# Altium schematic symbol library Schlib1.SchLib: 1 symbol
Pins are listed as number, name and electrical type; pins without a type are passive.

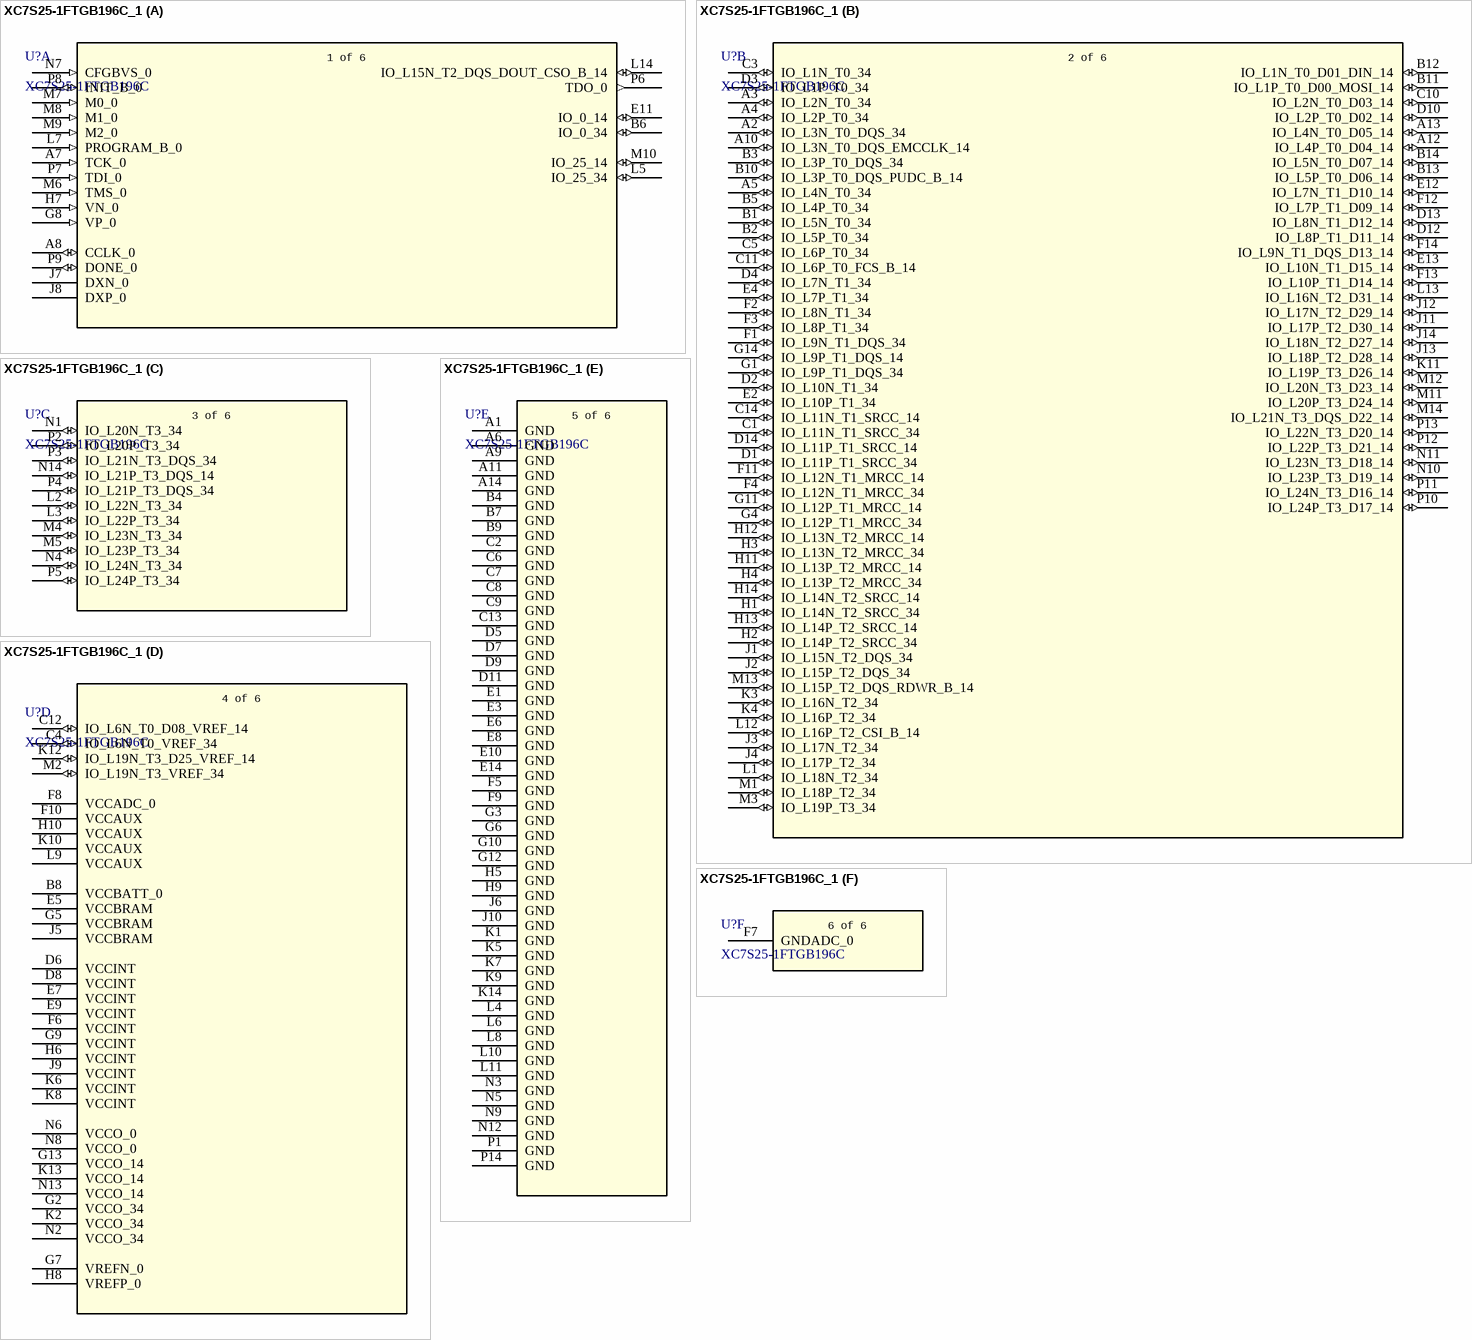
[diagram p0: symbol XC7S25-1FTGB196C_1]

## XC7S25-1FTGB196C_1
designator U?, comment XC7S25-1FTGB196C
Description; Manufacturer_Name: AMD; Type: Embedded; Copyright: Copyright (C) 2025 Ultra Librarian. All rights reserved.; Manufacturer_Part_Number: XC7S25-1FTGB196C; RefDes: RefDes
footprint FTGB196SPARTAN-7_AMD
part A pins: A7 TCK_0 (in), A8 CCLK_0 (io), B6 IO_0_34 (io), E11 IO_0_14 (io), G8 VP_0 (in), H7 VN_0 (in), J7 DXN_0, J8 DXP_0, L5 IO_25_34 (io), L7 PROGRAM_B_0 (in), L14 IO_L15N_T2_DQS_DOUT_CSO_B_14 (io), M6 TMS_0 (in), M7 M0_0 (in), M8 M1_0 (in), M9 M2_0 (in), M10 IO_25_14 (io), N7 CFGBVS_0 (in), P6 TDO_0 (out), P7 TDI_0 (in), P8 INIT_B_0 (io), P9 DONE_0 (io)
part B pins: A2 IO_L3N_T0_DQS_34 (io), A3 IO_L2N_T0_34 (io), A4 IO_L2P_T0_34 (io), A5 IO_L4N_T0_34 (io), A10 IO_L3N_T0_DQS_EMCCLK_14 (io), A12 IO_L4P_T0_D04_14 (io), A13 IO_L4N_T0_D05_14 (io), B1 IO_L5N_T0_34 (io), B2 IO_L5P_T0_34 (io), B3 IO_L3P_T0_DQS_34 (io), B5 IO_L4P_T0_34 (io), B10 IO_L3P_T0_DQS_PUDC_B_14 (io), B11 IO_L1P_T0_D00_MOSI_14 (io), B12 IO_L1N_T0_D01_DIN_14 (io), B13 IO_L5P_T0_D06_14 (io), B14 IO_L5N_T0_D07_14 (io), C1 IO_L11N_T1_SRCC_34 (io), C3 IO_L1N_T0_34 (io), C5 IO_L6P_T0_34 (io), C10 IO_L2N_T0_D03_14 (io), C11 IO_L6P_T0_FCS_B_14 (io), C14 IO_L11N_T1_SRCC_14 (io), D1 IO_L11P_T1_SRCC_34 (io), D2 IO_L10N_T1_34 (io), D3 IO_L1P_T0_34 (io), D4 IO_L7N_T1_34 (io), D10 IO_L2P_T0_D02_14 (io), D12 IO_L8P_T1_D11_14 (io), D13 IO_L8N_T1_D12_14 (io), D14 IO_L11P_T1_SRCC_14 (io), E2 IO_L10P_T1_34 (io), E4 IO_L7P_T1_34 (io), E12 IO_L7N_T1_D10_14 (io), E13 IO_L10N_T1_D15_14 (io), F1 IO_L9N_T1_DQS_34 (io), F2 IO_L8N_T1_34 (io), F3 IO_L8P_T1_34 (io), F4 IO_L12N_T1_MRCC_34 (io), F11 IO_L12N_T1_MRCC_14 (io), F12 IO_L7P_T1_D09_14 (io), F13 IO_L10P_T1_D14_14 (io), F14 IO_L9N_T1_DQS_D13_14 (io), G1 IO_L9P_T1_DQS_34 (io), G4 IO_L12P_T1_MRCC_34 (io), G11 IO_L12P_T1_MRCC_14 (io), G14 IO_L9P_T1_DQS_14 (io), H1 IO_L14N_T2_SRCC_34 (io), H2 IO_L14P_T2_SRCC_34 (io), H3 IO_L13N_T2_MRCC_34 (io), H4 IO_L13P_T2_MRCC_34 (io), H11 IO_L13P_T2_MRCC_14 (io), H12 IO_L13N_T2_MRCC_14 (io), H13 IO_L14P_T2_SRCC_14 (io), H14 IO_L14N_T2_SRCC_14 (io), J1 IO_L15N_T2_DQS_34 (io), J2 IO_L15P_T2_DQS_34 (io), J3 IO_L17N_T2_34 (io), J4 IO_L17P_T2_34 (io), J11 IO_L17P_T2_D30_14 (io), J12 IO_L17N_T2_D29_14 (io), J13 IO_L18P_T2_D28_14 (io), J14 IO_L18N_T2_D27_14 (io), K3 IO_L16N_T2_34 (io), K4 IO_L16P_T2_34 (io), K11 IO_L19P_T3_D26_14 (io), L1 IO_L18N_T2_34 (io), L12 IO_L16P_T2_CSI_B_14 (io), L13 IO_L16N_T2_D31_14 (io), M1 IO_L18P_T2_34 (io), M3 IO_L19P_T3_34 (io), M11 IO_L20P_T3_D24_14 (io), M12 IO_L20N_T3_D23_14 (io), M13 IO_L15P_T2_DQS_RDWR_B_14 (io), M14 IO_L21N_T3_DQS_D22_14 (io), N10 IO_L23P_T3_D19_14 (io), N11 IO_L23N_T3_D18_14 (io), P10 IO_L24P_T3_D17_14 (io), P11 IO_L24N_T3_D16_14 (io), P12 IO_L22P_T3_D21_14 (io), P13 IO_L22N_T3_D20_14 (io)
part C pins: L2 IO_L22N_T3_34 (io), L3 IO_L22P_T3_34 (io), M4 IO_L23N_T3_34 (io), M5 IO_L23P_T3_34 (io), N1 IO_L20N_T3_34 (io), N4 IO_L24N_T3_34 (io), N14 IO_L21P_T3_DQS_14 (io), P2 IO_L20P_T3_34 (io), P3 IO_L21N_T3_DQS_34 (io), P4 IO_L21P_T3_DQS_34 (io), P5 IO_L24P_T3_34 (io)
part D pins: B8 VCCBATT_0 (power), C4 IO_L6N_T0_VREF_34 (io), C12 IO_L6N_T0_D08_VREF_14 (io), D6 VCCINT (power), D8 VCCINT (power), E5 VCCBRAM (power), E7 VCCINT (power), E9 VCCINT (power), F6 VCCINT (power), F8 VCCADC_0 (power), F10 VCCAUX (power), G2 VCCO_34 (power), G5 VCCBRAM (power), G7 VREFN_0 (power), G9 VCCINT (power), G13 VCCO_14 (power), H6 VCCINT (power), H8 VREFP_0 (power), H10 VCCAUX (power), J5 VCCBRAM (power), J9 VCCINT (power), K2 VCCO_34 (power), K6 VCCINT (power), K8 VCCINT (power), K10 VCCAUX (power), K12 IO_L19N_T3_D25_VREF_14 (io), K13 VCCO_14 (power), L9 VCCAUX (power), M2 IO_L19N_T3_VREF_34 (io), N2 VCCO_34 (power), N6 VCCO_0 (power), N8 VCCO_0 (power), N13 VCCO_14 (power)
part E pins: A1 GND (power), A6 GND (power), A9 GND (power), A11 GND (power), A14 GND (power), B4 GND (power), B7 GND (power), B9 GND (power), C2 GND (power), C6 GND (power), C7 GND (power), C8 GND (power), C9 GND (power), C13 GND (power), D5 GND (power), D7 GND (power), D9 GND (power), D11 GND (power), E1 GND (power), E3 GND (power), E6 GND (power), E8 GND (power), E10 GND (power), E14 GND (power), F5 GND (power), F9 GND (power), G3 GND (power), G6 GND (power), G10 GND (power), G12 GND (power), H5 GND (power), H9 GND (power), J6 GND (power), J10 GND (power), K1 GND (power), K5 GND (power), K7 GND (power), K9 GND (power), K14 GND (power), L4 GND (power), L6 GND (power), L8 GND (power), L10 GND (power), L11 GND (power), N3 GND (power), N5 GND (power), N9 GND (power), N12 GND (power), P1 GND (power), P14 GND (power)
part F pins: F7 GNDADC_0 (power)
part A text: 1 of 6
part B text: 2 of 6
part C text: 3 of 6
part D text: 4 of 6
part E text: 5 of 6
part F text: 6 of 6